# Altium footprint library SamacSys.PcbLib: 1008 footprints (part 20 of 63)
Each footprint in its own frame and in the unit in brackets; x right, y up, seen from the top. Pads: shape width x height; smd on the part's side, far side on the other; paste and mask are expansions set on the pad; w line width, h text height; cw(c..) or ccw(c..) is an arc to the next point about the centre after c.
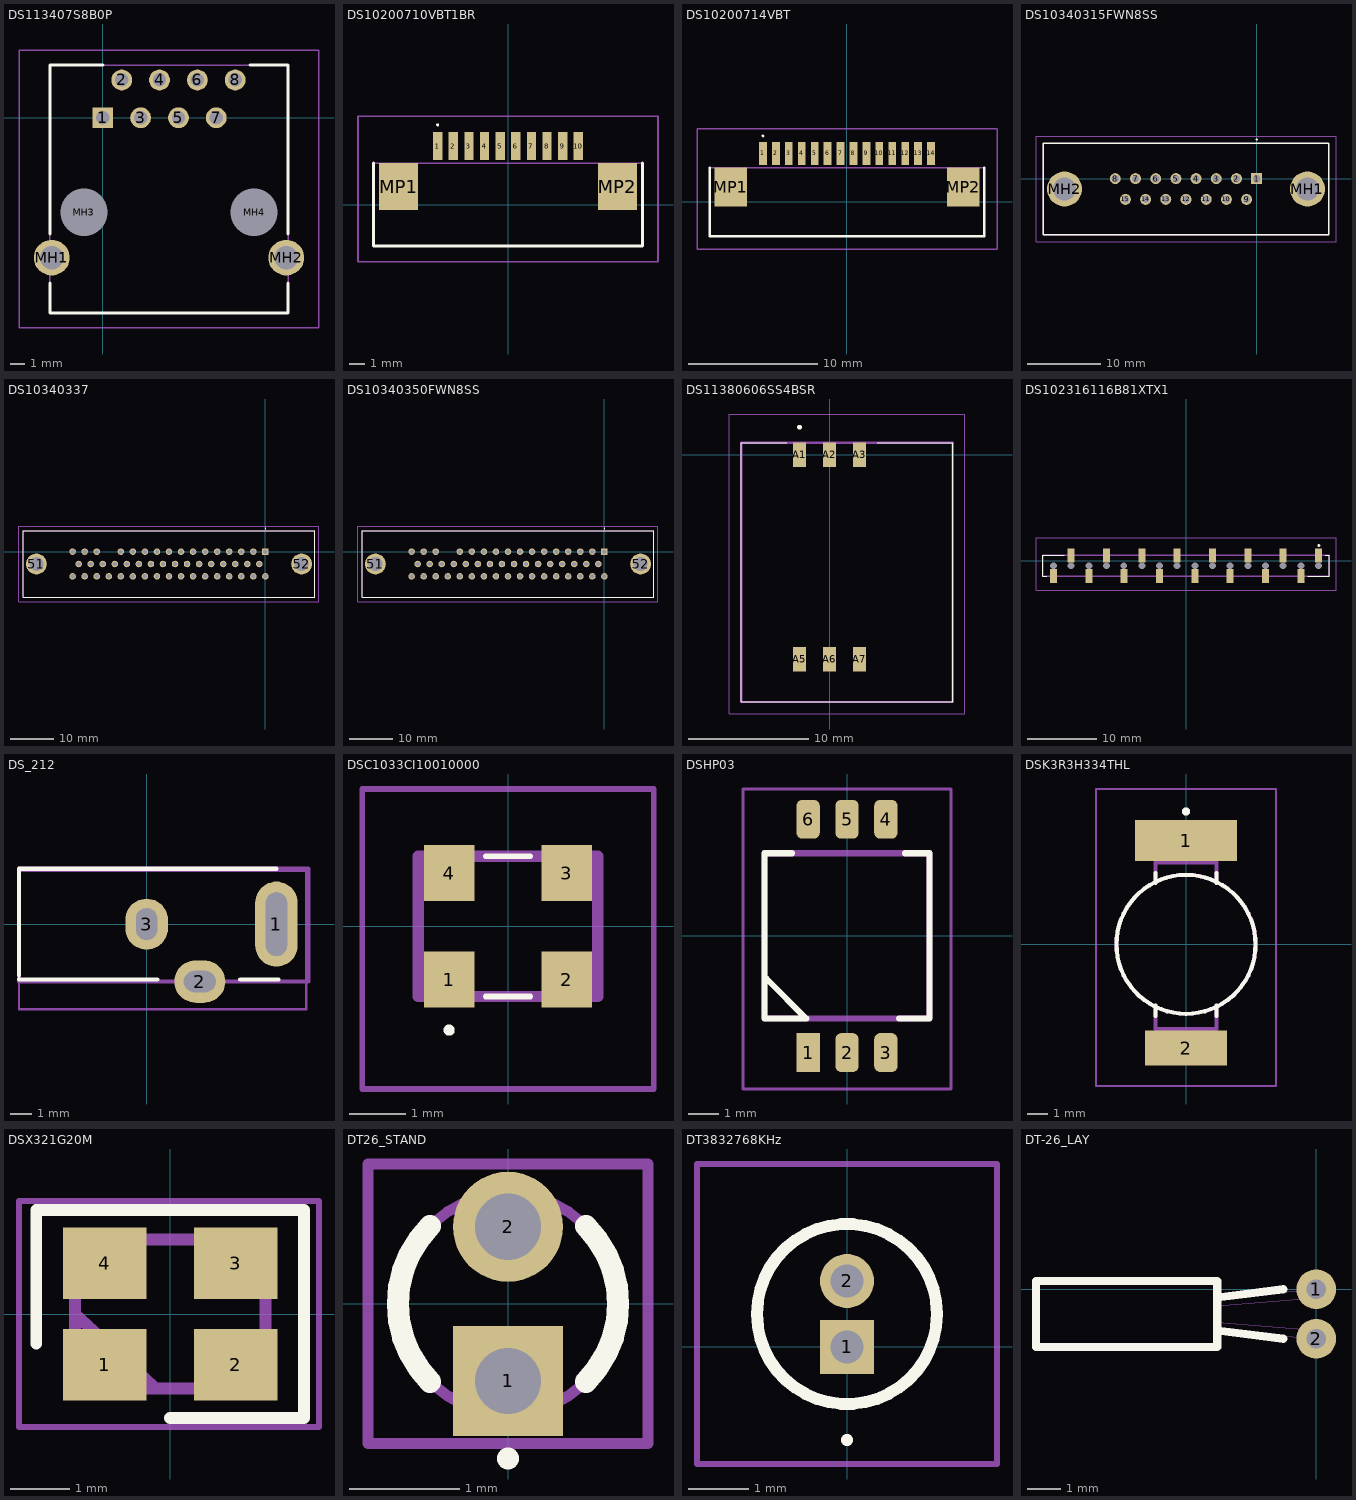
[diagram p19: the footprints below, top view; thin cyan lines are the x and y axes]

## DS113407S8B0P [mm]
pads (12):
  rect 1.4x1.4 hole 0.9: 1(0,0)
  round 1.4 hole 0.9: 2(1.27,2.54) 3(2.54,0) 4(3.81,2.54) 5(5.08,0) 6(6.35,2.54) 7(7.62,0) 8(8.89,2.54)
  round 2.4 hole 1.6: MH1(-3.43,-9.4) MH2(12.32,-9.4)
  round 1.585 hole 3.17 unplated: MH3(-1.27,-6.35) MH4(10.16,-6.35)
Top Overlay:
  lines w0.2: -3.555,-11.1 -3.555,-13.11 12.445,-13.11 12.445,-11.1 ; -3.555,-7.8 -3.555,3.54 0,3.54 ; 9.9,3.54 12.445,3.54 12.445,-7.8
Assembly:
  lines w0.1: -3.555,-13.11 12.445,-13.11 12.445,3.54 -3.555,3.54 -3.555,-13.11
Countryard:
  lines w0.1: -5.63,-14.11 14.52,-14.11 14.52,4.54 -5.63,4.54 -5.63,-14.11
3D body "DS1134-07-S8B0P.stp": height 17.08, standoff -5, extent -4.13,-13.11 13.02,3.54

## DS10200710VBT1BR [mm]
pads (12):
  rect 0.6x1.8 smd: 1(-4.5,3.75) 2(-3.5,3.75) 3(-2.5,3.75) 4(-1.5,3.75) 5(-0.5,3.75) 6(0.5,3.75) 7(1.5,3.75) 8(2.5,3.75) 9(3.5,3.75) 10(4.5,3.75)
  rect 2.5x3 smd: MP1(-7,1.15) MP2(7,1.15)
Top Overlay:
  lines w0.1: -4.5,5.05 cw(c-4.5,5.1) -4.5,5.15 cw(c-4.5,5.1) -4.5,5.05
  lines w0.2: -8.6,2.65 -8.6,-2.65 8.6,-2.65 8.6,2.65
Assembly:
  lines w0.1: -8.6,-2.65 -8.6,2.65 8.6,2.65 8.6,-2.65 -8.6,-2.65
Countryard:
  lines w0.1: -9.6,-3.65 -9.6,5.65 9.6,5.65 9.6,-3.65 -9.6,-3.65

## DS10200714VBT [mm]
pads (16):
  rect 0.6x1.8 smd: 1(-6.5,3.75) 2(-5.5,3.75) 3(-4.5,3.75) 4(-3.5,3.75) 5(-2.5,3.75) 6(-1.5,3.75) 7(-0.5,3.75) 8(0.5,3.75) 9(1.5,3.75) 10(2.5,3.75) 11(3.5,3.75) 12(4.5,3.75) 13(5.5,3.75) 14(6.5,3.75)
  rect 2.5x3 smd: MP1(-9,1.15) MP2(9,1.15)
Top Overlay:
  lines w0.1: -6.5,5.05 cw(c-6.5,5.1) -6.5,5.15 cw(c-6.5,5.1) -6.5,5.05
  lines w0.2: -10.6,2.65 -10.6,-2.65 10.6,-2.65 10.6,2.65
Assembly:
  lines w0.1: -10.6,-2.65 -10.6,2.65 10.6,2.65 10.6,-2.65 -10.6,-2.65
Countryard:
  lines w0.1: -11.6,-3.65 -11.6,5.65 11.6,5.65 11.6,-3.65 -11.6,-3.65
3D body "x10b25l14t.stp": height 2.5, standoff 0, extent -10.5,-2.65 10.5,4.1

## DS10340315FWN8SS [mm]
pads (17):
  rect 1.5x1.5 hole 1: 1(0,0)
  round 1.5 hole 1: 2(-2.77,0) 3(-5.54,0) 4(-8.31,0) 5(-11.08,0) 6(-13.85,0) 7(-16.62,0) 8(-19.39,0) 9(-1.385,-2.84) 10(-4.155,-2.84) 11(-6.925,-2.84) 12(-9.695,-2.84) 13(-12.465,-2.84) 14(-15.235,-2.84) 15(-18.005,-2.84)
  round 4.8 hole 3.2: MH1(6.965,-1.42) MH2(-26.355,-1.42)
Top Overlay:
  lines w0.2: 0,5.3 cw(c0,5.35) 0,5.4 ; 0,5.3 ccw(c0,5.35) 0,5.4 ; 0,5.3 cw(c0,5.35) 0,5.4 ; -29.265,-7.67 -29.265,4.83 9.875,4.83 9.875,-7.67 -29.265,-7.67
Assembly:
  lines w0.1: -29.265,-7.67 -29.265,4.83 9.875,4.83 9.875,-7.67 -29.265,-7.67
Countryard:
  lines w0.1: -30.265,-8.67 -30.265,5.83 10.875,5.83 10.875,-8.67 -30.265,-8.67
3D body "DS1034-03-15FWN8SS.stp": height 11.8, standoff -5, extent -29.265,-7.67 9.875,4.83

## DS10340337 [mm]
pads (51):
  rect 1.5x1.5 hole 1: 1(0,0)
  round 1.5 hole 1: 2(-2.77,0) 3(-5.54,0) 4(-8.31,0) 5(-11.08,0) 6(-13.85,0) 7(-16.62,0) 8(-19.39,0) 9(-22.16,0) 10(-24.93,0) 11(-27.7,0) 12(-30.47,0) 13(-33.24,0) 15(-38.78,0) 16(-41.55,0) 17(-44.32,0) 18(-1.385,-2.84) 19(-4.155,-2.84) 20(-6.925,-2.84) 21(-9.695,-2.84) 22(-12.465,-2.84) 23(-15.235,-2.84) 24(-18.005,-2.84) 25(-20.775,-2.84) 26(-23.545,-2.84) 27(-26.315,-2.84) 28(-29.085,-2.84) 29(-31.855,-2.84) 30(-34.625,-2.84) 31(-37.395,-2.84) 32(-40.165,-2.84) 33(-42.935,-2.84) 34(0,-5.68) 35(-2.77,-5.68) 36(-5.54,-5.68) 37(-8.31,-5.68) 38(-11.08,-5.68) 39(-13.85,-5.68) 40(-16.62,-5.68) 41(-19.39,-5.68) 42(-22.16,-5.68) 43(-24.93,-5.68) 44(-27.7,-5.68) 45(-30.47,-5.68) 46(-33.24,-5.68) 47(-36.01,-5.68) 48(-38.78,-5.68) 49(-41.55,-5.68) 50(-44.32,-5.68)
  round 4.8 hole 3.2: 51(-52.66,-2.84) 52(8.34,-2.84)
Top Overlay:
  lines w0.1: 0,5.3 ccw(c0,5.35) 0,5.4 ccw(c0,5.35) 0,5.3
  lines w0.2: -55.66,-10.49 11.34,-10.49 11.34,4.81 -55.66,4.81 -55.66,-10.49
Assembly:
  lines w0.1: -55.66,-10.49 11.34,-10.49 11.34,4.81 -55.66,4.81 -55.66,-10.49
Countryard:
  lines w0.1: -56.66,-11.49 12.34,-11.49 12.34,5.81 -56.66,5.81 -56.66,-11.49
3D body "DS1034-03-50FWN8SS.stp": height 12.4, standoff -5, extent -55.66,-10.49 11.34,4.81

## DS10340350FWN8SS [mm]
pads (51):
  rect 1.5x1.5 hole 1: 1(0,0)
  round 1.5 hole 1: 2(-2.77,0) 3(-5.54,0) 4(-8.31,0) 5(-11.08,0) 6(-13.85,0) 7(-16.62,0) 8(-19.39,0) 9(-22.16,0) 10(-24.93,0) 11(-27.7,0) 12(-30.47,0) 13(-33.24,0) 15(-38.78,0) 16(-41.55,0) 17(-44.32,0) 18(-1.385,-2.84) 19(-4.155,-2.84) 20(-6.925,-2.84) 21(-9.695,-2.84) 22(-12.465,-2.84) 23(-15.235,-2.84) 24(-18.005,-2.84) 25(-20.775,-2.84) 26(-23.545,-2.84) 27(-26.315,-2.84) 28(-29.085,-2.84) 29(-31.855,-2.84) 30(-34.625,-2.84) 31(-37.395,-2.84) 32(-40.165,-2.84) 33(-42.935,-2.84) 34(0,-5.68) 35(-2.77,-5.68) 36(-5.54,-5.68) 37(-8.31,-5.68) 38(-11.08,-5.68) 39(-13.85,-5.68) 40(-16.62,-5.68) 41(-19.39,-5.68) 42(-22.16,-5.68) 43(-24.93,-5.68) 44(-27.7,-5.68) 45(-30.47,-5.68) 46(-33.24,-5.68) 47(-36.01,-5.68) 48(-38.78,-5.68) 49(-41.55,-5.68) 50(-44.32,-5.68)
  round 4.8 hole 3.2: 51(-52.66,-2.84) 52(8.34,-2.84)
Top Overlay:
  lines w0.1: 0,5.3 cw(c0,5.35) 0,5.4 cw(c0,5.35) 0,5.3
  lines w0.2: -55.66,-10.49 -55.66,4.81 11.34,4.81 11.34,-10.49 -55.66,-10.49
Assembly:
  lines w0.1: -55.66,-10.49 -55.66,4.81 11.34,4.81 11.34,-10.49 -55.66,-10.49
Countryard:
  lines w0.1: -56.66,-11.49 -56.66,5.81 12.34,5.81 12.34,-11.49 -56.66,-11.49
3D body "DS1034-03-50FWN8SS.stp": height 12.4, standoff -5, extent -55.66,-10.49 11.34,4.81

## DS11380606SS4BSR [mm]
pads (6):
  rect 1.1x2.03 smd: A1(-2.5,0) A2(0,0) A3(2.5,0) A5(-2.5,-17.03) A6(0,-17.03) A7(2.5,-17.03)
Top Overlay:
  lines w0.1: -3.55,0.985 -7.35,0.985 -7.35,-20.605 10.25,-20.605 10.25,0.985 3.95,0.985
  lines w0.2: -2.5,2.19 ccw(c-2.5,2.29) -2.5,2.39 ccw(c-2.5,2.29) -2.5,2.19
Assembly:
  lines w0.2: -7.35,-20.605 10.25,-20.605 10.25,0.985 -7.35,0.985 -7.35,-20.605
Countryard:
  lines w0.1: -8.35,-21.605 11.25,-21.605 11.25,3.39 -8.35,3.39 -8.35,-21.605
3D body "DS1138-06-06SS4BSR.stp": height 2.2, standoff 0, extent -7.35,-20.605 10.25,0.985

## DS102316116B81XTX1 [mm]
pads (32):
  rect 1x2 smd: 1(19.05,0.75) 2(16.51,-2.25) 3(13.97,0.75) 4(11.43,-2.25) 5(8.89,0.75) 6(6.35,-2.25) 7(3.81,0.75) 8(1.27,-2.25) 9(-1.27,0.75) 10(-3.81,-2.25) 11(-6.35,0.75) 12(-8.89,-2.25) 13(-11.43,0.75) 14(-13.97,-2.25) 15(-16.51,0.75) 16(-19.05,-2.25)
  round 0.5 hole 1 unplated: 17(19.05,-0.75) 18(16.51,-0.75) 19(13.97,-0.75) 20(11.43,-0.75) 21(8.89,-0.75) 22(6.35,-0.75) 23(3.81,-0.75) 24(1.27,-0.75) 25(-1.27,-0.75) 26(-3.81,-0.75) 27(-6.35,-0.75) 28(-8.95,-0.75) 29(-11.43,-0.75) 30(-13.95,-0.75) 31(-16.51,-0.75) 32(-19.05,-0.75)
Top Overlay:
  lines w0.1: -20,-2.25 -20.57,-2.25 -20.57,0.75 -17.5,0.75 ; 17.5,-2.25 18,-2.25 20.57,-2.25 20.57,0.75 20,0.75
  lines w0.2: 19,2.15 cw(c19.1,2.15) 19.2,2.15 cw(c19.1,2.15) 19,2.15
Assembly:
  lines w0.2: -20.57,-2.25 20.57,-2.25 20.57,0.75 -20.57,0.75 -20.57,-2.25
Countryard:
  lines w0.1: -21.57,-4.25 21.57,-4.25 21.57,3.25 -21.57,3.25 -21.57,-4.25

## DS_212 [mm] "DC Barrel Jack"
pads (3):
  rrect100% 2x4 hole 1 slot 3 at 90 deg unplated: 1(6.1,0)
  rrect100% 2.4x2 hole 1 slot 1.5 at 0 deg unplated: 2(2.5,-2.7)
  rrect100% 2x2.4 hole 1 slot 1.5 at 90 deg unplated: 3(0,0)
Top Overlay:
  lines w0.2: -6,-2.6 0.5,-2.6 ; -6,-2.4 -6,2.6 6.1,2.6 ; 4.4,-2.6 6.2,-2.6
Assembly:
  lines w0.2: -6,-2.7 -6,2.6 7.6,2.6 7.6,-2.7 -6,-2.7
Countryard:
  lines w0.1: -6,-4 -6,2.5 7.5,2.5 7.5,-4 -6,-4

## DSC1033CI10010000 [mm]
pads (4):
  rect 0.9x1 smd: 1(-1.05,-0.95) 2(1.05,-0.95) 3(1.05,0.95) 4(-1.05,0.95)
Top Overlay:
  lines w0.1: -0.4,-1.25 0.4,-1.25 ; -0.4,1.25 0.4,1.25 ; -1.05,-1.9 cw(c-1.05,-1.85) -1.05,-1.8 cw(c-1.05,-1.85) -1.05,-1.9
Assembly:
  lines w0.2: -1.6,-1.25 1.6,-1.25 1.6,1.25 -1.6,1.25 -1.6,-1.25
Countryard:
  lines w0.1: -2.6,-2.9 2.6,-2.9 2.6,2.45 -2.6,2.45 -2.6,-2.9
3D body "DSC1033CI1-001.0000.stp": height 1, standoff 0, extent -1.6,-1.36 1.6,1.36

## DSHP03 [mm] "DIP Switch SMD"
height 6
pads (6):
  rect 0.76x1.27 smd: 1(-1.27,-3.81)
  rrect50% 0.76x1.27 smd: 2(0,-3.81) 3(1.27,-3.81) 4(1.27,3.81) 5(0,3.81) 6(-1.27,3.81)
Top Overlay:
  lines w0.2: -2.7,-2.7 -2.7,2.7 -1.8,2.7 ; -2.63,-2.7 -1.33,-2.7 -2.63,-1.4 ; 1.7,-2.7 2.7,-2.7 2.7,2.7 1.9,2.7
Assembly:
  lines w0.2: -2.7,-2.7 -2.7,2.7 2.7,2.7 2.7,-2.7 -2.7,-2.7
Countryard:
  lines w0.1: -3.4,-5 -3.4,4.8 3.4,4.8 3.4,-5 -3.4,-5

## DSK3R3H334THL [mm]
pads (2):
  rect 5x2 smd: 1(0,5.075)
  rect 4x1.7 smd: 2(0,-5.075)
Top Overlay:
  lines w0.2: -1.5,-3.5 -1.5,-3 ; -1.5,3 -1.5,3.5 ; 1.5,-3.5 1.5,-3 ; 1.5,3 1.5,3.5 ; -3.4,0 ccw(c0,0) 3.4,0 ccw(c0,0) -3.4,0 ; -0.1,6.5 ccw(c0,6.5) 0.1,6.5 ccw(c0,6.5) -0.1,6.5
Assembly:
  lines w0.2: -1.5,-3 -1.5,-4.15 1.5,-4.15 1.5,-3 ; -1.5,3 -1.5,4 1.5,4 1.5,3 ; -3.4,0 ccw(c0,0) 3.4,0 ccw(c0,0) -3.4,0
Countryard:
  lines w0.1: -4.4,-6.925 -4.4,7.6 4.4,7.6 4.4,-6.925 -4.4,-6.925
3D body "DSK-3R3H224U-HL.stp": height 2.87, standoff 0, extent -3.4,-5.6 3.4,5.7

## DSX321G20M [mm] "3225 OSC"
pads (4):
  rect 1.4x1.2 smd: 1(-1.1,-0.85) 2(1.1,-0.85) 3(1.1,0.85) 4(-1.1,0.85)
Top Overlay:
  lines w0.2: -2.25,-0.5 -2.25,1.75 2.25,1.75 2.25,-1.75 0,-1.75
  text "." at -2.889,-1.139 h4
Assembly:
  lines w0.2: -1.6,0 -0.3,-1.2 ; -1.6,-1.25 -1.6,1.25 1.6,1.25 1.6,-1.25 -1.6,-1.25
Countryard:
  lines w0.1: -2.54,-1.9 -2.54,1.9 2.5,1.9 2.5,-1.9 -2.54,-1.9
3D body "DSX321G-20M.stp": height 1.1, standoff 0, extent -1.68,-1.33 1.68,1.33

## DT26_STAND [mm]
pads (2):
  rect 1x1 hole 0.6: 1(0,-0.7)
  round 1 hole 0.6: 2(0,0.7)
Top Overlay:
  lines w0.1: 0,-1.454 ccw(c0,-1.404) 0,-1.354 ccw(c0,-1.404) 0,-1.454
  lines w0.2: -0.707,-0.707 cw(c0,0) -0.707,0.707 ; 0.707,-0.707 ccw(c0,0) 0.707,0.707
Assembly:
  lines w0.1: -1,0 ccw(c0,0) 1,0 ccw(c0,0) -1,0
Countryard:
  lines w0.1: -1.27,-1.27 1.27,-1.27 1.27,1.27 -1.27,1.27 -1.27,-1.27
3D body "DT-26_32.768KHz.stp": height 6.2, standoff -5, extent -1,-0.897 1,1.089

## DT3832768KHz [mm]
pads (2):
  rect 0.9x0.9 hole 0.55: 1(0,0)
  round 0.9 hole 0.55: 2(0,1.1)
Top Overlay:
  lines w0.1: 0,-1.6 cw(c0,-1.55) 0,-1.5 cw(c0,-1.55) 0,-1.6
  lines w0.2: -1.5,0.55 cw(c0,0.55) 1.5,0.55 cw(c0,0.55) -1.5,0.55
Assembly:
  lines w0.1: -1.5,0.55 cw(c0,0.55) 1.5,0.55 cw(c0,0.55) -1.5,0.55
Countryard:
  lines w0.1: -2.5,-1.95 -2.5,3.05 2.5,3.05 2.5,-1.95 -2.5,-1.95
3D body "DT-38_32.768KHz.stp": height 8.4, standoff -5, extent -1.5,-0.939 1.5,2.039

## DT-26_LAY [mm]
pads (2):
  round 1.2 hole 0.6: 1(0,0) 2(0,-1.5)
Top Overlay:
  lines w0.25: -3,-1.25 -1,-1.5 ; -3,-0.25 -1,0 ; -8.5,-1.75 -3,-1.75 -3,0.25 -8.5,0.25 -8.5,-1.75
3D Body:
  lines w0.025: -3,-1.25 0,-1.5 0,-1.25 -3,-1 ; -3,-0.5 0,-0.25 0,0 -3,-0.25 ; -8.5,-1.75 -3,-1.75 -3,0.25 -8.5,0.25 -8.5,-1.75
3D body "User Library-XTAL_DT26.step": height 2.04, standoff -1.87, extent -8.2,-2.191 0.181,0.591